# Altium integrated library BAT54.IntLib: 1 symbol
Pins are listed as number, name and electrical type; pins without a type are passive.

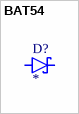
[diagram p0: symbol BAT54]

## BAT54
designator D?
Diode Schottky 30 V 200mA Surface Mount SOT-523; MF: SMC Diode Solutions; MP: BAT54; SnapEDA_Link: https://www.snapeda.com/parts/BAT54/SMC/view-part/?ref=snap; Package: None; Value: *; Check_prices: https://www.snapeda.com/parts/BAT54/SMC/view-part/?ref=eda
footprint SOT23
pins: 1 A, 3 C